# Altium footprint library Footprint-Lib-PhilsLab.PcbLib: 544 footprints (part 23 of 34)
Each footprint in its own frame and in the unit in brackets; x right, y up, seen from the top. Pads: shape width x height; smd on the part's side, far side on the other; paste and mask are expansions set on the pad; w line width, h text height; cw(c..) or ccw(c..) is an arc to the next point about the centre after c.
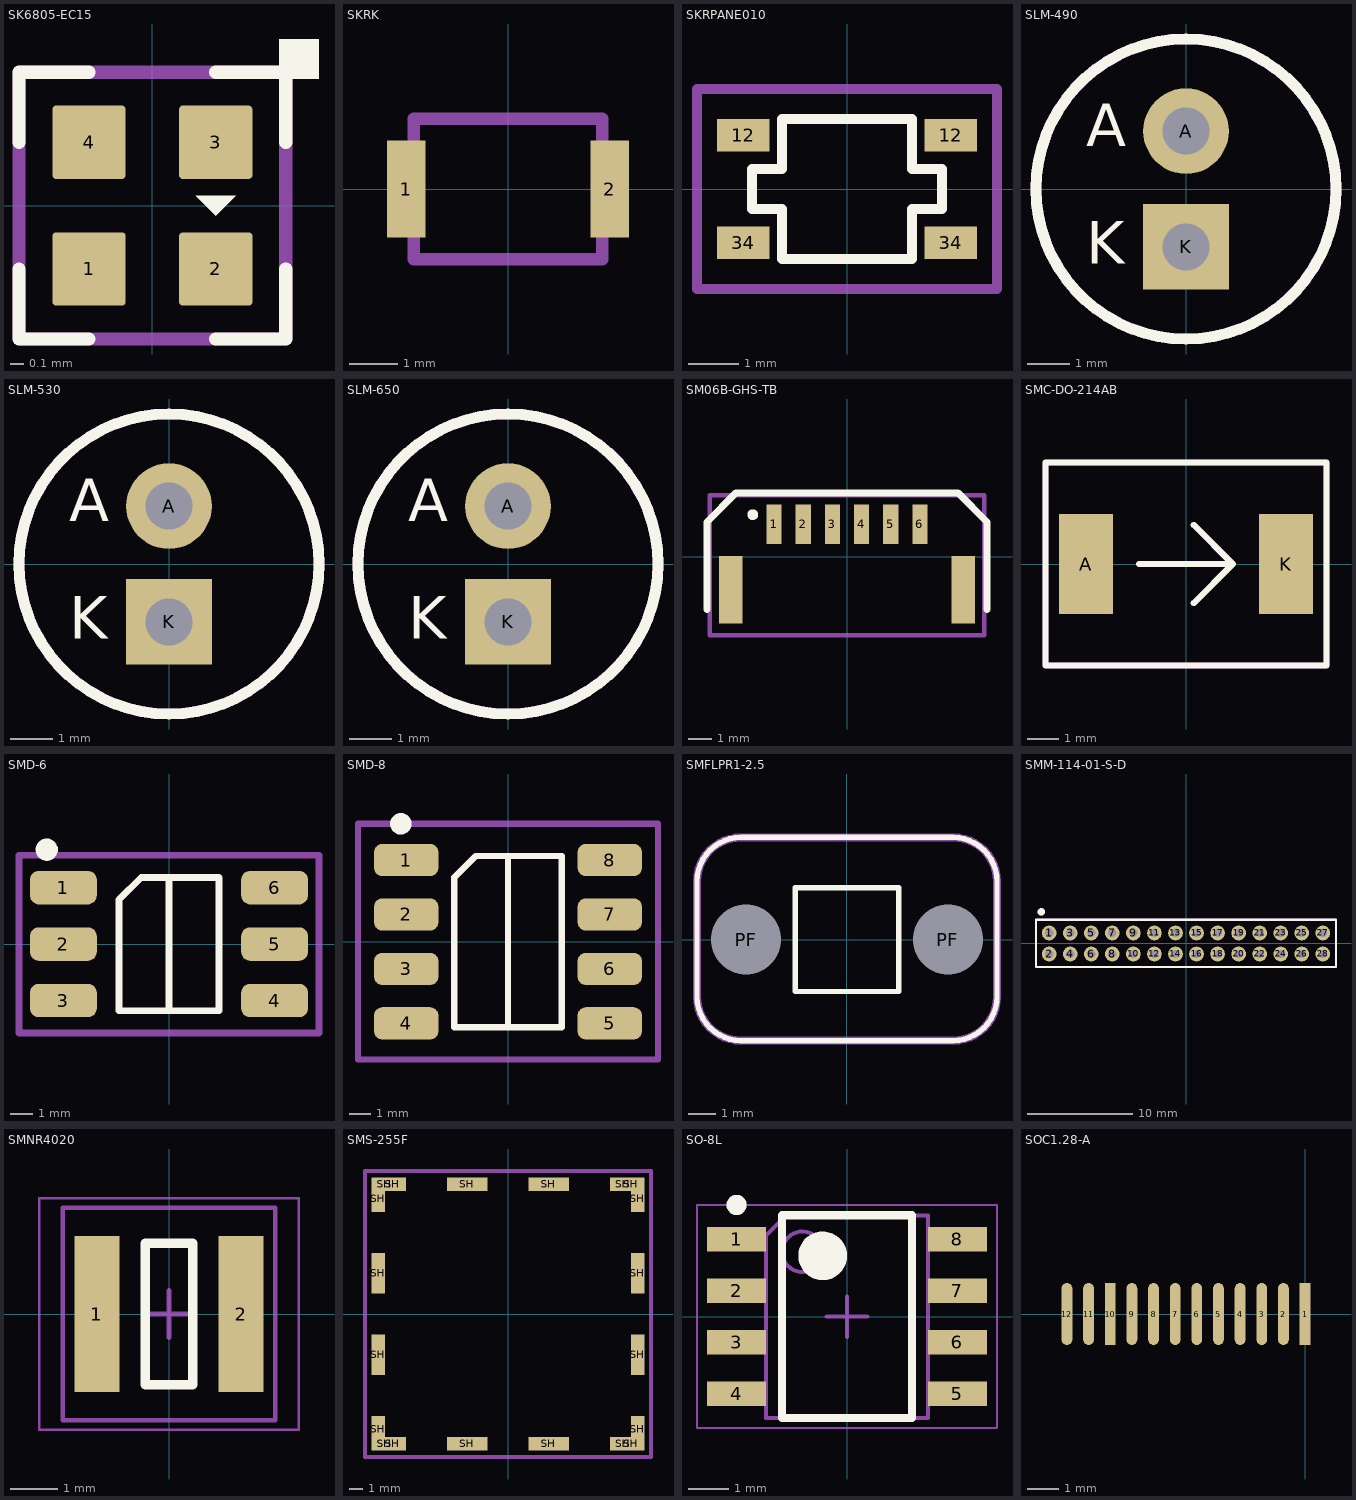
[diagram p22: the footprints below, top view; thin cyan lines are the x and y axes]

## SK6805-EC15 [mm]
pads (4):
  rrect10% 0.55x0.55 smd: 1(-0.475,-0.475) 2(0.475,-0.475) 3(0.475,0.475) 4(-0.475,0.475)
Top Overlay:
  rectangle: 0.95,0.949 1.25,1.249
  region: 0.325,0.075 0.475,-0.075 0.625,0.075
  lines w0.1: -1,-0.475 -1,-1 -0.475,-1 ; -1,0.475 -1,1 -0.475,1 ; 0.475,-1 1,-1 1,-0.475 ; 0.475,1 1,1 1,0.475
Mechanical 13:
  lines w0.1: -1,-1 1,-1 1,1 -1,1 -1,-1
  text "'.Designator'" at -5.665,-0.417 h1
  text "3" at 1.1,1.05 h0.3
3D body "SK6805-EC15.STEP": height 0.66, standoff 0.01, extent -0.75,-0.75 0.75,0.75

## SKRK [mm]
pads (2):
  rect 0.8x2 smd: 1(-2.1,0) 2(2.1,0)
Mechanical 13:
  lines w0.254: -1.95,-1.45 1.95,-1.45 ; -1.95,-1.45 -1.95,1.45 ; -1.95,-1.45 1.95,-1.45 ; -1.95,1.45 1.95,1.45 ; -1.95,1.45 1.95,1.45 ; 1.95,-1.45 1.95,1.45
3D body "skrkaee010.SLDPRT": height 2, standoff 0, extent -2.4,-1.45 2.4,1.45

## SKRPANE010 [mm]
pads (4):
  rect 1.05x0.65 smd: 12(-2.075,1.075) 12(2.075,1.075) 34(-2.075,-1.075) 34(2.075,-1.075)
Top Overlay:
  lines w0.2: -1.9,-0.4 -1.9,0.4 -1.3,0.4 -1.3,1.4 1.3,1.4 1.3,0.4 1.9,0.4 1.9,-0.4 1.3,-0.4 1.3,-1.4 -1.3,-1.4 -1.3,-0.4 -1.9,-0.4
Mechanical 13:
  lines w0.2: -3,-2 3,-2 3,2 -3,2 -3,-2
  text "'.Designator'" at -6.315,-1.4 h1
3D body "SKRPANE010.step": height 2.51, standoff 0.01, extent -2.3,-1.6 2.3,1.6

## SLM-490 [mm]
pads (2):
  round 2 hole 1.1: A(0,1.35)
  rect 2x2 hole 1.1: K(0,-1.35)
Top Overlay:
  circle w0.254: c0,0 r3.5
  text "A" at -2.333,1 h1
  text "K" at -2.333,-1.75 h1
Bottom Overlay:
  circle w0.254: c0,0 r3.5
  text "K" at -1.667,-1.75 h1
  text "A" at -1.667,1 h1
Mechanical 13:
  circle w0.254: c0,0 r3.5
  text "'.Designator'" at -5.665,-0.417 h1
  text "A" at -0.333,1 h1
  text "K" at -0.333,-1.75 h1
3D body "SLM-490.step": height 16.78, standoff 0.01, extent -3.683,-3.683 3.683,3.683
3D body "LED-5mm.STEP": height 21.8, standoff -14, extent -3,-2.5 3,3

## SLM-530 [mm]
pads (2):
  round 2 hole 1.1: A(0,1.35)
  rect 2x2 hole 1.1: K(0,-1.35)
Top Overlay:
  circle w0.254: c0,0 r3.5
  text "A" at -2.333,1 h1
  text "K" at -2.333,-1.75 h1
Bottom Overlay:
  circle w0.254: c0,0 r3.5
  text "K" at -1.667,-1.75 h1
  text "A" at -1.667,1 h1
Mechanical 13:
  circle w0.254: c0,0 r3.5
  text "'.Designator'" at -5.665,-0.417 h1
  text "A" at -0.333,1 h1
  text "K" at -0.333,-1.75 h1
3D body "LED-5mm.STEP": height 22.8, standoff -13, extent -3,-2.5 3,3
3D body "SLM-530.step": height 17.79, standoff 0.01, extent -3.683,-3.683 3.683,3.683

## SLM-650 [mm]
pads (2):
  round 2 hole 1.1: A(0,1.35)
  rect 2x2 hole 1.1: K(0,-1.35)
Top Overlay:
  circle w0.254: c0,0 r3.5
  text "A" at -2.333,1 h1
  text "K" at -2.333,-1.75 h1
Bottom Overlay:
  circle w0.254: c0,0 r3.5
  text "K" at -1.667,-1.75 h1
  text "A" at -1.667,1 h1
Mechanical 13:
  circle w0.254: c0,0 r3.5
  text "'.Designator'" at -5.665,-0.417 h1
  text "A" at -0.333,1 h1
  text "K" at -0.333,-1.75 h1
3D body "LED-5mm.STEP": height 25.85, standoff -9.95, extent -2.99,-2.5 2.99,3
3D body "SLM-650.step": height 20.84, standoff 0.01, extent -3.683,-3.683 3.683,3.683

## SM06B-GHS-TB [mm]
pads (8):
  rect 0.65x1.7 smd: 1(-3.125,1.4) 2(-1.875,1.4) 3(-0.625,1.4) 4(0.625,1.4) 5(1.875,1.4) 6(3.125,1.4)
  rect 1x2.9 smd: ""(-4.975,-1.4) ""(4.975,-1.4)
Top Overlay:
  circle w0.254: c-4.035,1.813 r0.103
  lines w0.3: -6,-2.25 -6,1.5 -4.75,2.75 4.75,2.75 6,1.5 6,-2.25
Mechanical 13:
  circle w0.25: c-3.125,1.75 r0.1
  lines w0.2: -5.875,-3.35 -5.875,-1.35 -5.875,2.65 5.875,2.65 5.875,-3.35 -5.875,-3.35
  text "'.Designator'" at -5.665,-0.417 h1
3D body "SM06B-GHS-TB.STEP": height 4.26, standoff 0.01, extent -5.375,-2.8 5.375,2.05

## SMC-DO-214AB [mm]
pads (2):
  rect 1.72x3.2 smd: A(-3.2,0) K(3.2,0)
Top Overlay:
  lines w0.2: -1.5,0 1.5,0 ; 0.25,-1.25 1.5,0 ; 0.25,1.25 1.5,0 ; -4.5,-3.25 -4.5,3.25 4.5,3.25 4.5,-3.25 -4.5,-3.25
Mechanical 13:
  lines w0.2: -4.5,-3.25 4.5,-3.25 4.5,3.25 -4.5,3.25 -4.5,-3.25
  text "'.Designator'" at -5.665,-0.417 h1
  text "A" at -2.583,1.25 h1
  text "K" at 1.917,1.25 h1
3D body "SMC-DO-214AB.step": height 2.32, standoff 0.01, extent -3.975,-2.95 3.975,2.95

## SMD-6 [mm]
pads (6):
  rrect50% 3x1.5 smd: 1(-4.75,2.54) 2(-4.75,0) 3(-4.75,-2.54) 4(4.75,-2.54) 5(4.75,0) 6(4.75,2.54)
Top Overlay:
  circle w0.5: c-5.5,4.25 r0.25
  lines w0.3: 0,-3 0,3 ; 0,3 2.25,3 2.25,-3 -2.25,-3 -2.25,2 -1.25,3 0,3
Mechanical 13:
  circle w0.5: c-4.75,2.5 r0.25
  lines w0.3: -6.75,-4 -6.75,4 6.75,4 6.75,-4 -0.5,-4 -6.75,-4
  text ".Designator" at -4.998,-0.333 h1
3D body "SMD-6.stp": height 4.6, standoff 0, extent -5.08,-3.65 5.08,3.65

## SMD-8 [mm]
pads (8):
  rrect50% 3x1.5 smd: 1(-4.75,3.81) 2(-4.75,1.27) 3(-4.75,-1.27) 4(-4.75,-3.81) 5(4.75,-3.81) 6(4.75,-1.27) 7(4.75,1.27) 8(4.75,3.81)
Top Overlay:
  circle w0.5: c-5,5.5 r0.25
  lines w0.3: 0,-4 0,4 ; 0,4 2.5,4 2.5,-4 -2.5,-4 -2.5,3 -1.5,4 0,4
Mechanical 13:
  circle w0.5: c-4.732,3.828 r0.25
  lines w0.3: -7,-5.5 -7,5.5 7,5.5 7,-5.5 0,-5.5 -7,-5.5
  text ".Designator" at -4.998,-0.333 h1
3D body "SMD-8.step": height 4.21, standoff 0.01, extent -4.825,-4.825 4.825,4.825

## SMFLPR1-2.5 [mm]
pads (2):
  round 2.5 hole 2.565 unplated: PF(-3.7,0) PF(3.7,0)
Top Overlay:
  lines w0.2: -5.5,-2.088 ccw(c-3.888,-2.088) -3.888,-3.7 3.888,-3.7 ccw(c3.888,-2.088) 5.5,-2.088 5.5,2.138 ccw(c3.888,2.138) 3.888,3.75 -3.888,3.75 ccw(c-3.888,2.138) -5.5,2.138 -5.5,-2.088 ; -1.9,-1.9 1.9,-1.9 1.9,1.9 -1.9,1.9 -1.9,-1.9
Mechanical 13:
  lines w0.3: -5.5,-2.088 ccw(c-3.888,-2.088) -3.888,-3.7 3.888,-3.7 ccw(c3.888,-2.088) 5.5,-2.088 5.5,2.138 ccw(c3.888,2.138) 3.888,3.75 -3.888,3.75 ccw(c-3.888,2.138) -5.5,2.138 -5.5,-2.088
  text "'.Designator'" at -5.665,-0.417 h1
3D body "SMFLPR1-2_5.step": height 32.48, standoff -3.16, extent -5.456,-3.483 5.456,3.502

## SMM-114-01-S-D [mm]
pads (28):
  round 1.4 hole 0.8 paste-2539.97: 1(-13,1) 2(-13,-1) 3(-11,1) 4(-11,-1) 5(-9,1) 6(-9,-1) 7(-7,1) 8(-7,-1) 9(-5,1) 10(-5,-1) 11(-3,1) 12(-3,-1) 13(-1,1) 14(-1,-1) 15(1,1) 16(1,-1) 17(3,1) 18(3,-1) 19(5,1) 20(5,-1) 21(7,1) 22(7,-1) 23(9,1) 24(9,-1) 25(11,1) 26(11,-1) 27(13,1) 28(13,-1)
Top Overlay:
  circle w0.5: c-13.75,3 r0.1
  lines w0.2: -14.25,-2.25 -14.25,2.25 14.25,2.25 14.25,-2.25 -14.25,-2.25
Mechanical 13:
  circle w0.5: c-13.75,3 r0.1
  lines w0.2: -14.25,-2.25 14.25,-2.25 14.25,2.25 -14.25,2.25 -14.25,-2.25
  text "2" at -13.483,-1.65 h1
  text "1" at -13.317,0.35 h1
  text "'.Designator'" at -5.815,-0.9 h1
3D body "SMM-114-01-S-D.stp": height 3.57, standoff -3.04, extent -13.993,-2 13.993,2

## SMNR4020 [mm] "Inductor SMNR4020"
height 2.2
pads (2):
  rect 0.95x3.3 smd: 1(-1.525,0) 2(1.525,0)
Top Overlay:
  lines w0.2: -0.5,-1.5 -0.5,1.5 0.5,1.5 0.5,-1.5 -0.5,-1.5
Mechanical 13:
  lines w0.1: -2.25,-2.25 2.25,-2.25 2.25,2.25 -2.25,2.25 -2.25,-2.25
  text ".Designator" at -4.998,-0.333 h1
Mechanical 15:
  lines w0.05: -2.75,-2.45 2.75,-2.45 2.75,2.45 -2.75,2.45 -2.75,-2.45
  lines w0.1: -0.5,0 0.5,0 ; 0,-0.5 0,0.5
3D body "SMNR4020.step": height 2.2, standoff 0, extent -2.15,-2.15 2.15,2.15

## SMS-255F [mm]
pads (20):
  rect 1x1.91 smd: SH(-9.525,-8.455) SH(-9.525,8.455) SH(9.525,-8.455) SH(9.525,8.455)
  rect 1x3 smd: SH(-9.525,-3) SH(-9.525,3) SH(9.525,-3) SH(9.525,3)
  rect 1.91x1 smd: SH(-9.07,-9.525) SH(-9.07,9.525) SH(-8.455,-9.525) SH(-8.455,9.525) SH(8.455,-9.525) SH(8.455,9.525) SH(9.07,-9.525) SH(9.07,9.525)
  rect 3x1 smd: SH(-3,-9.525) SH(-3,9.525) SH(3,-9.525) SH(3,9.525)
Mechanical 13:
  lines w0.3: -10.5,-10.5 10.5,-10.5 10.5,10.5 -10.5,10.5 -10.5,-7.5 -10.5,-10.5
  text "'.Designator'" at -5.84,-0.925 h1
3D body "SMS-255F.STEP": height 5.21, standoff 0, extent -9.925,-9.925 9.925,9.925

## SO-8L [mm] "SOIC, 8-Leads, Body 4.90x3.90mm, Pitch 1.27mm, IPC Medium Density"
height 1.75
pads (8):
  rect 1.45x0.6 smd: 1(-2.725,1.905) 2(-2.725,0.635) 3(-2.725,-0.635) 4(-2.725,-1.905) 5(2.725,-1.905) 6(2.725,-0.635) 7(2.725,0.635) 8(2.725,1.905)
Top Overlay:
  circle w0.25: c-2.725,2.755 r0.125
  circle w0.6: c-0.6,1.5 r0.3
  lines w0.2: -1.6,-2.5 -1.6,2.5 1.6,2.5 1.6,-2.5 -1.6,-2.5
Mechanical 13:
  circle w0.1: c-1.1,1.6 r0.5
  lines w0.1: -2,-2.5 -2,2 -1.5,2.5 2,2.5 2,-2.5 -2,-2.5
  text "'.Designator'" at -7.752,-1.087 h1.25
Mechanical 15:
  lines w0.05: -3.7,-2.75 -3.7,2.75 3.7,2.75 3.7,-2.75 -3.7,-2.75
  lines w0.1: -0.5,0 0.5,0 ; 0,-0.5 0,0.5
3D body "SO-8L.step": height 1.75, standoff 0, extent -3,-2.5 3,2.5

## SOC1.28-A [mm]
pads (12):
  rect 0.35x2 smd: 1(0,0) 10(-6.3,0)
  oval 0.35x2 smd: 2(-0.7,0) 3(-1.4,0) 4(-2.1,0) 5(-2.8,0) 6(-3.5,0) 7(-4.2,0) 8(-4.9,0) 9(-5.6,0) 11(-7,0) 12(-7.7,0)
3D body "GC9A01.STEP": height 2.82, standoff 0.05, extent -21,-9.096 14.498,29.296